# Altium footprint library HDEMB1204SM.PcbLib: 1 footprints
Each footprint in its own frame and in the unit in brackets; x right, y up, seen from the top. Pads: shape width x height; smd on the part's side, far side on the other; paste and mask are expansions set on the pad; w line width, h text height; cw(c..) or ccw(c..) is an arc to the next point about the centre after c.
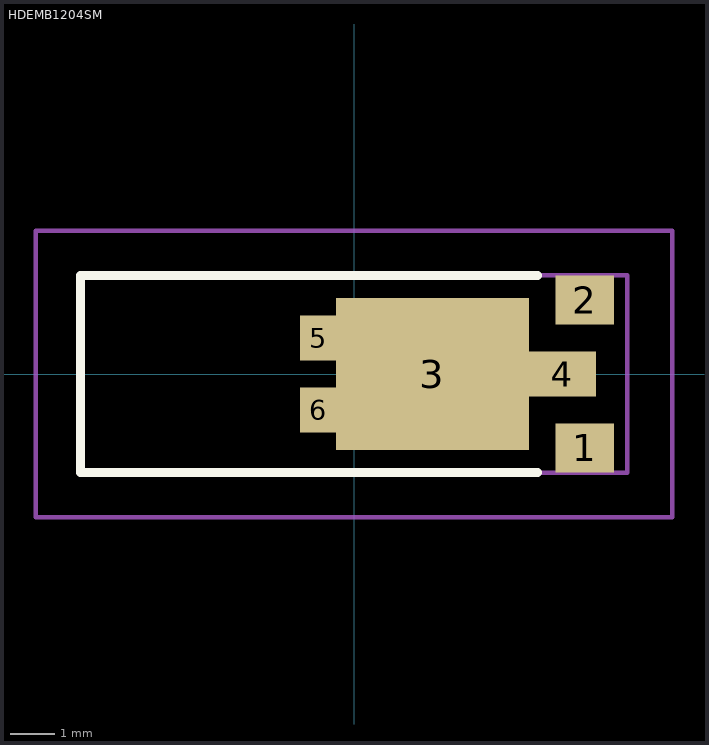
[diagram p0: the footprint, top view; thin cyan lines are the x and y axes]

## HDEMB1204SM [mm]
pads (6):
  rect 1.3x1.1 smd: 1(5.15,-1.65) 2(5.15,1.65)
  rect 4.3x3.4 smd: 3(1.75,0)
  rect 1.5x1 smd: 4(4.65,0)
  rect 0.8x1 smd: 5(-0.8,0.8) 6(-0.8,-0.8)
Top Overlay:
  lines w0.2: 4.1,-2.2 -6.1,-2.2 -6.1,2.2 4.1,2.2
Mechanical 15:
  lines w0.1: -6.1,-2.2 6.1,-2.2 6.1,2.2 -6.1,2.2 -6.1,-2.2
Mechanical 20:
  lines w0.1: -7.1,-3.2 7.1,-3.2 ; -7.1,-3.2 -7.1,3.2 ; -7.1,-3.2 7.1,-3.2 ; -7.1,-3.2 -7.1,3.2 ; -7.1,3.2 7.1,3.2 ; -7.1,3.2 7.1,3.2 ; 7.1,-3.2 7.1,3.2 ; 7.1,-3.2 7.1,3.2